# EAGLE library part PTD904-2015KC104 (library PTD904-2015Kc104)
Potentiometer 4 Gang 100 kOhms 25 mW Source: Datasheet <https://www.mouser.com/datasheet/2/54/ptd90-777943.pdf>
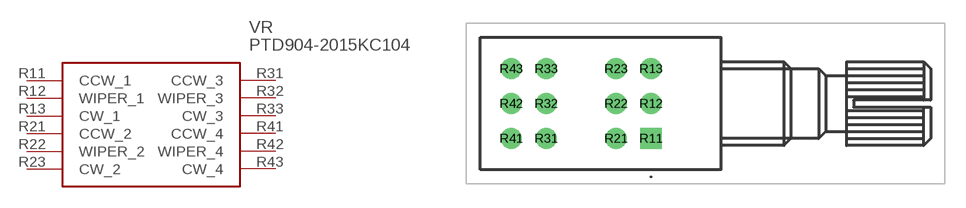
[diagram p0: symbol with the pads of PTD9042015Kc104; footprint PTD9042015Kc104]

Designator prefix VR

## PTD904-2015KC104 (Description: Potentiometer 4 Gang 100 kOhms 25 mW; Height: 11.9mm; Manufacturer_Name: Bourns; Manufacturer_Part_Number: PTD904-2015Kc104; Mouser_Part_Number: 652-PTD9042015KC104; Mouser_Price-Stock: https://www.mouser.co.uk/ProductDetail/Bourns/PTD904-2015Kc104?qs=5lbl9CW7Yx%252BG%252B7znTmxxmQ%3D%3D)  [PTD9042015Kc104]
R11  CCW_1
R12  WIPER_1
R13  CW_1
R21  CCW_2
R22  WIPER_2
R23  CW_2
R31  CCW_3
R32  WIPER_3
R33  CW_3
R41  CCW_4
R42  WIPER_4
R43  CW_4

## Footprint PTD9042015Kc104 (pad centres in mm)
PTD904-2015Kc104-2
drill 1 pad 1.5 square: R11 0,0
drill 1 pad 1.5: R12 0,2.5; R13 0,5; R21 -2.5,0; R22 -2.5,2.5; R23 -2.5,5; R31 -7.5,0; R32 -7.5,2.5; R33 -7.5,5; R41 -10,0; R42 -10,2.5; R43 -10,5